# EAGLE library part SPIRIT1QTR (library SPIRIT1QTR)
Source: Datasheet <http://www.st.com/web/en/resource/technical/document/datasheet/DM00047607.pdf>
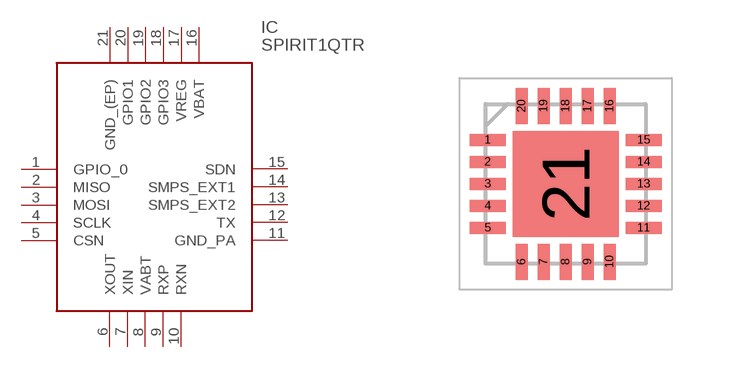
[diagram p0: symbol with the pads of QFN55P400X400X100-21N; footprint QFN55P400X400X100-21N]

Designator prefix IC

## SPIRIT1QTR (Height: 1mm; Manufacturer_Name: STMicroelectronics; Manufacturer_Part_Number: SPIRIT1QTR; Mouser_Part_Number: 511-SPIRIT1QTR; Mouser_Price-Stock: https://www.mouser.co.uk/ProductDetail/STMicroelectronics/SPIRIT1QTR?qs=TAo1I7FhABuyeu4sKj1BKQ%3D%3D)  [QFN55P400X400X100-21N]
1  GPIO_0
2  MISO
3  MOSI
4  SCLK  in
5  CSN  in
6  XOUT  out
7  XIN  in
8  VABT
9  RXP
10  RXN
11  GND_PA  pwr
12  TX
13  SMPS_EXT2
14  SMPS_EXT1
15  SDN
16  VBAT
17  VREG
18  GPIO3
19  GPIO2
20  GPIO1
21  GND_(EP)  pwr

## Footprint QFN55P400X400X100-21N (pad centres in mm)
QFN20
smd 0.9 x 0.3: 1 -1.95,1.1; 2 -1.95,0.55; 3 -1.95,0; 4 -1.95,-0.55; 5 -1.95,-1.1; 11 1.95,-1.1; 12 1.95,-0.55; 13 1.95,0; 14 1.95,0.55; 15 1.95,1.1
smd 0.3 x 0.9: 6 -1.1,-1.95; 7 -0.55,-1.95; 8 0,-1.95; 9 0.55,-1.95; 10 1.1,-1.95; 16 1.1,1.95; 17 0.55,1.95; 18 0,1.95; 19 -0.55,1.95; 20 -1.1,1.95
smd 2.65 x 2.65: 21 0,0